# Altium schematic symbol library 046841015100846+.SchLib: 1 symbol
Pins are listed as number, name and electrical type; pins without a type are passive.

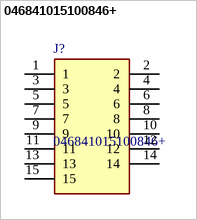
[diagram p0: symbol 046841015100846+]

## 046841015100846+
designator J?
FFC & FPC Connectors; Manufacturer_Name: Kyocera AVX; Geometry.Height: 3.6mm; Mouser Part Number: 346-046841015100846+; Mouser Price/Stock: https://www.mouser.co.uk/ProductDetail/Kyocera-Electronic-Components/046841015100846%2b?qs=PzGy0jfpSMuyQjeU3eGyKw%3D%3D; Manufacturer_Part_Number: 046841015100846+; Datasheet Link: https://www.mouser.de/datasheet/2/909/6841-1381151.pdf
footprint 046841015100846
pins: 1, 2, 3, 4, 5, 6, 7, 8, 9, 10, 11, 12, 13, 14, 15